# EAGLE library part TP4056-TYPEC-PROT (library moto-hud)
TP4056-TYPEC-PROT TP4056 Type-C 1S LiPo sarj + DW01 koruma karti. Kart: 26.0 x 17.0 mm - Guven: M STEP: GrabCAD 'TP4056 type-c module'
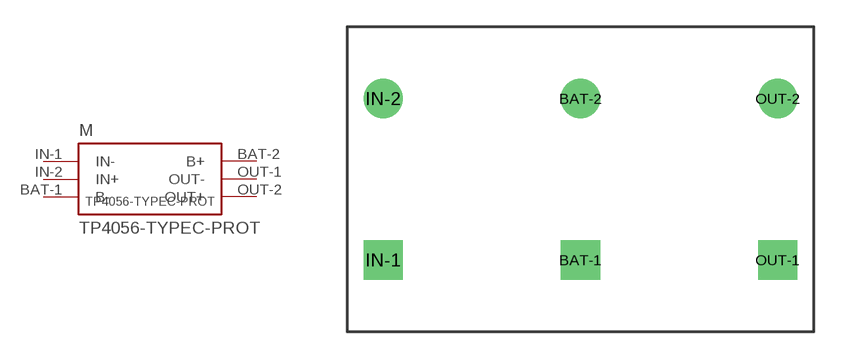
[diagram p1: symbol with the pads of TP4056-TYPEC-PROT; footprint TP4056-TYPEC-PROT]

Designator prefix M

## TP4056-TYPEC-PROT (BOARD_SIZE: 26.0x17.0mm; CONFIDENCE: M)  [TP4056-TYPEC-PROT]
BAT-1  B-  pas
BAT-2  B+  pas
IN-1  IN-  pas
IN-2  IN+  pas
OUT-1  OUT-  pas
OUT-2  OUT+  pas

## Footprint TP4056-TYPEC-PROT (pad centres in mm)
TP4056 Type-C 1S LiPo sarj + DW01 koruma karti. | Kart: 26.0 x 17.0 mm | Guven: M
drill 1 pad 2.2 square: BAT-1 0,-4.5; IN-1 -11,-4.5; OUT-1 11,-4.5
drill 1 pad 2.2 round: BAT-2 0,4.5; IN-2 -11,4.5; OUT-2 11,4.5